# Altium schematic symbol library Schlib1.SchLib: 2 symbols
Pins are listed as number, name and electrical type; pins without a type are passive.

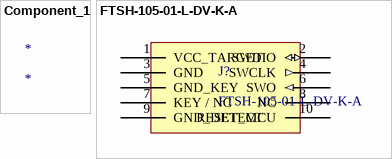
[diagram p0: symbols Component_1 to FTSH-105-01-L-DV-K-A]

## Component_1
designator *

## FTSH-105-01-L-DV-K-A
designator J?
• Connector Header Vertical 10 Position 1.27mm (0.050") SMT Gold, ARM Cortex Debug SWD; Manufacturer: Samtec Inc.; Manufacturer Part Number: FTSH-105-01-L-DV-K-A; Application: STM32 SWD Debug Port
pins: 1 VCC_TARGET (power), 2 SWDIO (io), 3 GND (power), 4 SWCLK (out), 5 GND_KEY, 6 SWO (in), 7 KEY / NC, 8 NC, 9 GND_DETECT, 10 RESET_MCU (oc)